# Altium schematic symbol library KartaRfLibs.SchLib: 43 symbols
Pins are listed as number, name and electrical type; pins without a type are passive.

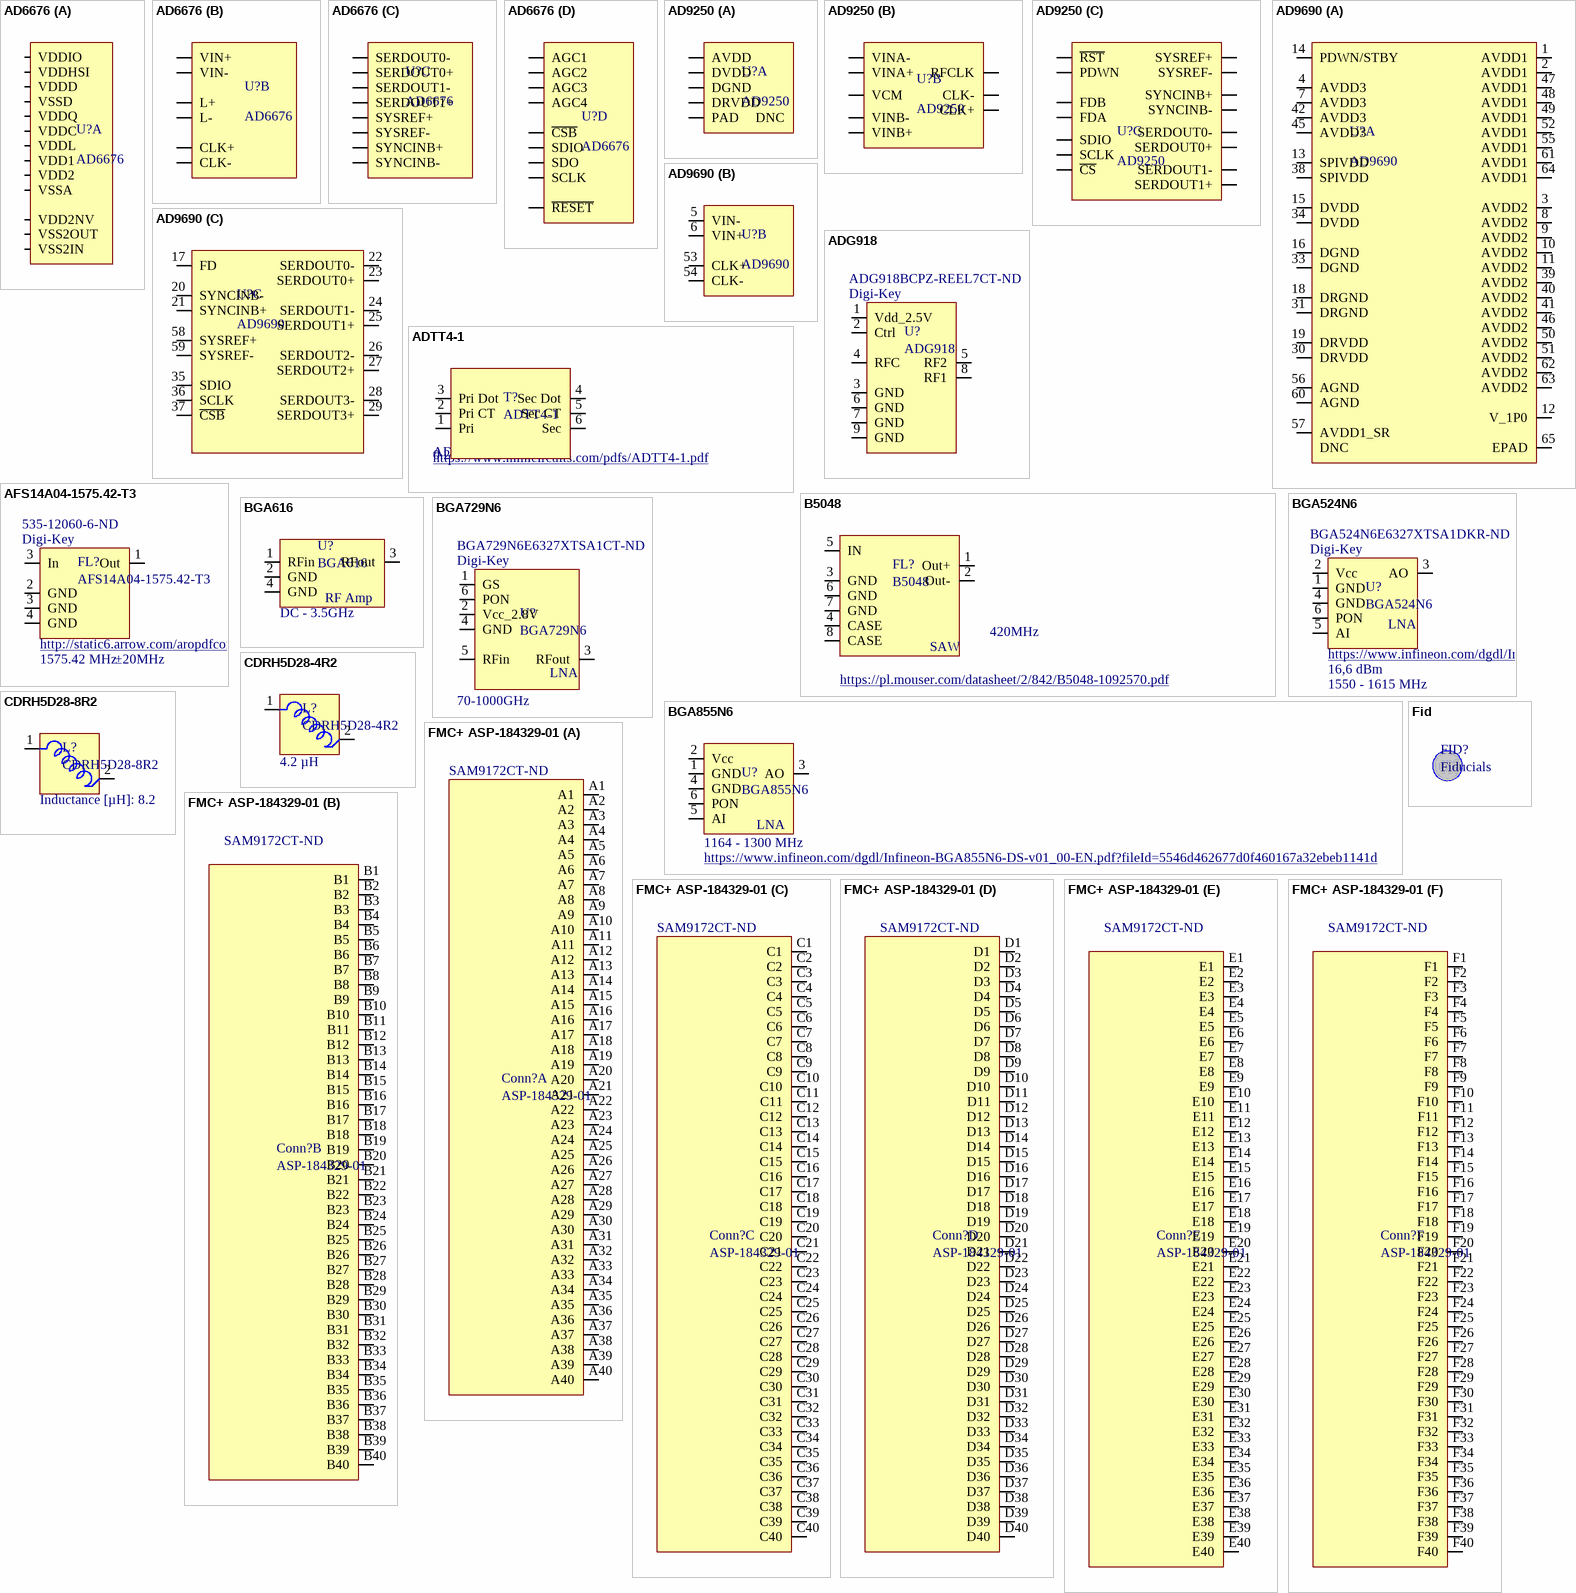
[diagram p0: symbols AD6676 to FMC+ ASP-184329-01]

## AD6676
designator U?
footprint AD6676_BGA80C50P8X10_429X504X60 (AD6676 BGA, 80-Leads, Body 4,29x5,04mmx0,60mm, Pitch 0,50mm)
part A pins: A1 VDDQ, A2,A4,B2,B3,B5,C3,C4,C6,D3,D7 VDD1, A3, A8, B4, C5, C7, D6, D8, E1, E2,E3, E4, E5, E6, F1, F2, F3, F8 VSSA, A5,B6,B7,E7,E8 VDD2, C2,D1,D2 VDDC, D4,D5 VDDL, F4,F5,G2,G3,G4,G5,H2 VSSD, F6 VSS2IN, F7 VDD2NV, G7 VSS2OUT, G8 VDDIO, H3,H4,H5,J3,J4,J5 VDDD, J1,J2 VDDHSI
part B pins: A6 L+, A7 L-, B1 CLK+, B8 VIN+, C1 CLK-, C8 VIN-
part C pins: G1 SYSREF+, H1 SYSREF-, K1 SERDOUT0-, K2 SERDOUT0+, K3 SERDOUT1-, K4 SERDOUT1+, K5 SYNCINB+, K6 SYNCINB-
part D pins: G6 ~{RESET}, H6 SDO, H7 AGC4, H8 AGC2, J6 ~{CSB}, J7 AGC3, J8 AGC1, K7 SCLK, K8 SDIO

## AD9250
designator U?
footprint AD9250 (AD5250, QFN, 48-Leads, Body 7,00x7,00mm, Pitch 0,50mm, Thermal Pad 5,60x5,60mm, IPC Medium Density)
part A pins: 1, 5, 8, 36, 37, 40, 41, 43, 44, 47, 48 AVDD, 9, 11, 13, 16, 24, 25, 30 DVDD, 12, 28, 29, 35 DNC, 17, 23 DGND, 20 DRVDD, 49 PAD
part B pins: 2 RFCLK, 3 CLK-, 4 CLK+, 38 VINA-, 39 VINA+, 42 VCM, 45 VINB+, 46 VINB-
part C pins: 6 SYSREF+, 7 SYSREF-, 10 ~{RST}, 14 SYNCINB+, 15 SYNCINB-, 18 SERDOUT1+, 19 SERDOUT1-, 21 SERDOUT0-, 22 SERDOUT0+, 26 FDB, 27 FDA, 31 SDIO, 32 SCLK, 33 ~{CS}, 34 PDWN

## AD9690
designator U?
Supplier 1: Digi-Key; Supplier Part Number 1: AD9690BCPZ-500-ND
footprint AD9690 (AD9690 9 x 9mm, 64 pin, 0.5 pitch 7.6sq Pad)
part A pins: 1 AVDD1, 2 AVDD1, 3 AVDD2, 4 AVDD3, 7 AVDD3, 8 AVDD2, 9 AVDD2, 10 AVDD2, 11 AVDD2, 12 V_1P0, 13 SPIVDD, 14 PDWN/STBY, 15 DVDD, 16 DGND, 18 DRGND, 19 DRVDD, 30 DRVDD, 31 DRGND, 33 DGND, 34 DVDD, 38 SPIVDD, 39 AVDD2, 40 AVDD2, 41 AVDD2, 42 AVDD3, 44, 43, 32 DNC, 45 AVDD3, 46 AVDD2, 47 AVDD1, 48 AVDD1, 49 AVDD1, 50 AVDD2, 51 AVDD2, 52 AVDD1, 55 AVDD1, 56 AGND, 57 AVDD1_SR, 60 AGND, 61 AVDD1, 62 AVDD2, 63 AVDD2, 64 AVDD1, 65 EPAD
part B pins: 5 VIN-, 6 VIN+, 53 CLK+, 54 CLK-
part C pins: 17 FD, 20 SYNCINB-, 21 SYNCINB+, 22 SERDOUT0-, 23 SERDOUT0+, 24 SERDOUT1-, 25 SERDOUT1+, 26 SERDOUT2-, 27 SERDOUT2+, 28 SERDOUT3-, 29 SERDOUT3+, 35 SDIO, 36 SCLK, 37 ~{CSB}, 58 SYSREF+, 59 SYSREF-

## ADG918
designator U?  Supplier 1: Digi-Key  Supplier Part Number 1: ADG918BCPZ-REEL7CT-ND
Supplier: Digi-Key; Supplier Part Number: ADG918BCPZ-REEL7CT-ND
footprint CP-8-13 (CP-8-13, 8-Leads, Body 3,00x3,00mm, Pitch 0,50mm, Thermal Pad 0,00x0,00mm, IPC Medium Density)
pins: 1 Vdd_2.5V, 2 Ctrl, 3 GND, 4 RFC, 5 RF2, 6 GND, 7 GND, 8 RF1, 9 GND

## ADTT4-1
designator T?  Frequency: 0.2 to 120MHz
URL: https://www.minicircuits.com/pdfs/ADTT4-1.pdf; Part Number: ADTT4-1
footprint CD636 (CD636,  6-Leads, Body 7,78x7,62mm, Pitch 2,45mm, IPC Medium Density)
pins: 1 Pri, 2 Pri CT, 3 Pri Dot, 4 Sec Dot, 5 Sec CT, 6 Sec

## AFS14A04-1575.42-T3
designator FL?  BW: ±20MHz  Fc: 1575.42 MHz  Supplier 1: Digi-Key  Supplier Part Number 1: 535-12060-6-ND
Part Number: AFS14A04-1575.42-T3; Supplier: Digi-Key; Supplier Part Number: 535-12060-1-ND; URL: http://static6.arrow.com/aropdfconversion/5a24a491d00decde14d1d2c137940a1b59312f0e/89afs14a04-1575.42-t3.pdf
footprint AFS14A04-1575.42-T3 (AFS14A04-1575.42-T3, SAW Filter, 6-Leads, Body 1,40x0,90mm, Pitch 0,50mm, IPC Medium Density)
pins: 1 Out, 2 GND, 3 In, 3 GND, 4 GND

## B5048
designator FL?  Fc: 420MHz
BW: 20MHz; Part Number: B5048; URL: https://pl.mouser.com/datasheet/2/842/B5048-1092570.pdf; Supplier 1: Digi-Key; Supplier Part Number 1: B39421B5048Z810-ND; Supplier 2: Mouser; Supplier Part Number 2: 871-B39421B5048Z810
footprint B5048 (B5048, Tetra SAW, QFN, 8-Leads, Body 3,80x3,80mm, Pitch 1,27mm, IPC Medium Density)
pins: 1 Out+, 2 Out-, 3 GND, 4 CASE, 5 IN, 6 GND, 7 GND, 8 CASE
text: SAW

## BGA524N6
designator U?  Operating Frequency: 1550 - 1615 MHz  Gain: 16,6 dBm  Supplier 1: Digi-Key  Supplier Part Number 1: BGA524N6E6327XTSA1DKR-ND
Part Number: BGA524N6; URL: https://www.infineon.com/dgdl/Infineon-BGA524N6-DS-v03_00-en.pdf?fileId=db3a304344e406b50144e44dfad302b9
footprint TSNP-6-10-FP (TSNP-6-10-FP, SOTFL, 6-Leads, Body 1,10x0,80mm, Pitch 0,40mm, IPC Medium Density)
pins: 1 GND, 2 Vcc, 3 AO, 4 GND, 5 AI, 6 PON
text: LNA

## BGA616
designator U?  Frequency: DC - 3.5GHz
Supplier 1: Digi-Key; Supplier Part Number 1: BGA616H6327XTSA1CT-ND
footprint GPS05605 (SOT343, 4-Leads, Body 2,00x2,15mm, Pitch 1,30mm, IPC High Density)
pins: 1 RFin, 2 GND, 3 RFout, 4 GND
text: RF Amp

## BGA729N6
designator U?  Frequency: 70-1000GHz  Supplier 1: Digi-Key  Supplier Part Number 1: BGA729N6E6327XTSA1CT-ND
Part Number: BGA729N6
footprint TSNP-6-10-FP (TSNP-6-10-FP, SOTFL, 6-Leads, Body 1,10x0,80mm, Pitch 0,40mm, IPC Medium Density)
pins: 1 GS, 2 Vcc_2.8V, 3 RFout, 4 GND, 5 RFin, 6 PON
text: LNA

## BGA855N6
designator U?  Frequency range: 1164 - 1300 MHz
Part Number: BGA855N6; URL: https://www.infineon.com/dgdl/Infineon-BGA855N6-DS-v01_00-EN.pdf?fileId=5546d462677d0f460167a32ebeb1141d
footprint TSNP-6-10-FP (TSNP-6-10-FP, SOTFL, 6-Leads, Body 1,10x0,80mm, Pitch 0,40mm, IPC Medium Density)
pins: 1 GND, 2 Vcc, 3 AO, 4 GND, 5 AI, 6 PON
text: LNA

## CDRH5D28-4R2
designator L?  Inductance: 4.2 µH
Supplier 1: Digi-Key; Supplier Part Number 1: 308-2193-1-ND
footprint CDRH5D28 (CDRH5D28 , Precision Wire Wound Inductor, 2-Leads, Body 6,00x6,00mm, IPC High Density)
pins: 1, 2

## CDRH5D28-8R2
designator L?  Inductance [µH]: 8.2
Part Number: CDRH5D28NP-8R2; Supplier Part Number 2: 308-2309-6-ND; Supplier 2: Digi-Key
footprint CDRH5D28 (CDRH5D28 , Precision Wire Wound Inductor, 2-Leads, Body 6,00x6,00mm, IPC High Density)
pins: 1, 2

## Fid
designator FID?, comment Fiducials
footprint Fiducials

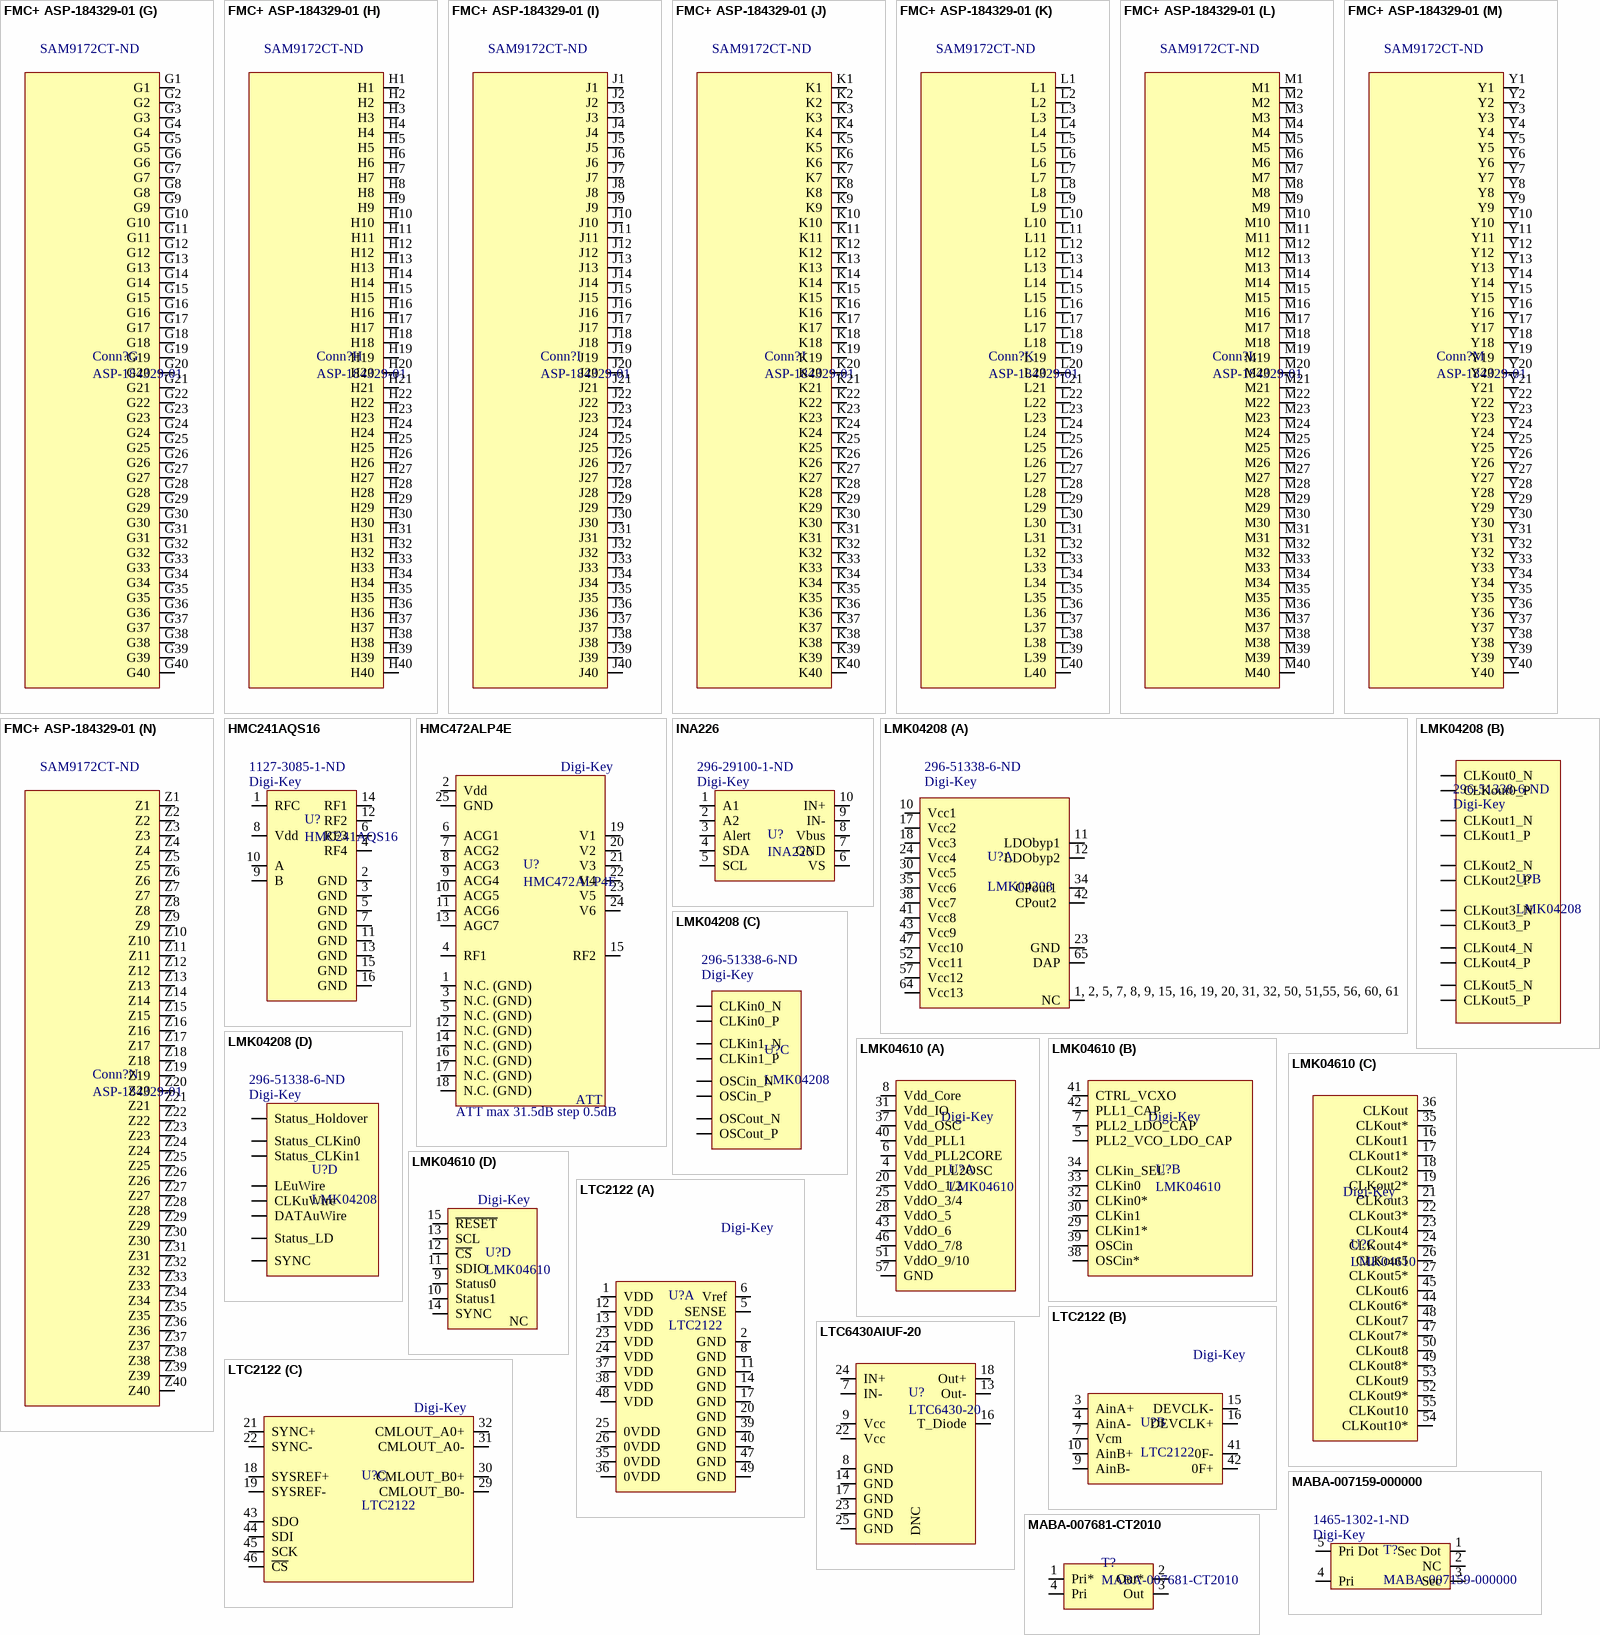
[diagram p1: symbols FMC+ ASP-184329-01 to MABA-007681-CT2010]

## FMC+ ASP-184329-01
designator Conn?, comment ASP-184329-01  Supplier Part Number 1: SAM9172CT-ND
Manufacturer: Samtec; Description: 14 ROW .050 PITCH SCKT ARRAY ASS; Supplier 1: Digi-Key; Manufacturer Part Number: ASP-184329-01; Stock 1: 900; Pricing 1: 1 = 42,21000, 10 = 38,09900, 25 = 36,50240, 50 = 34,22100, 100 = 33,08030 (USD); RoHS: No; ComponentLink1URL: http://suddendocs.samtec.com/prints/asp-184329-01-mkt.pdf?src-supplier=Digi-Key; ComponentLink1Description: http://suddendocs.samtec.com/prints/asp-184329-01-mkt.pdf?src-supplier=Digi-Key
footprint ASP-184330-01 (Samtec ASP-184330-01 FMC+ connector, 560-Leads, Body 55,78x19,76mmx7,11mm, Pitch 1,27mm)
part A pins: A1, A2, A3, A4, A5, A6, A7, A8, A9, A10, A11, A12, A13, A14, A15, A16, A17, A18, A19, A20, A21, A22, A23, A24, A25, A26, A27, A28, A29, A30, A31, A32, A33, A34, A35, A36, A37, A38, A39, A40
part B pins: B1, B2, B3, B4, B5, B6, B7, B8, B9, B10, B11, B12, B13, B14, B15, B16, B17, B18, B19, B20, B21, B22, B23, B24, B25, B26, B27, B28, B29, B30, B31, B32, B33, B34, B35, B36, B37, B38, B39, B40
part C pins: C1, C2, C3, C4, C5, C6, C7, C8, C9, C10, C11, C12, C13, C14, C15, C16, C17, C18, C19, C20, C21, C22, C23, C24, C25, C26, C27, C28, C29, C30, C31, C32, C33, C34, C35, C36, C37, C38, C39, C40
part D pins: D1, D2, D3, D4, D5, D6, D7, D8, D9, D10, D11, D12, D13, D14, D15, D16, D17, D18, D19, D20, D21, D22, D23, D24, D25, D26, D27, D28, D29, D30, D31, D32, D33, D34, D35, D36, D37, D38, D39, D40
part E pins: E1, E2, E3, E4, E5, E6, E7, E8, E9, E10, E11, E12, E13, E14, E15, E16, E17, E18, E19, E20, E21, E22, E23, E24, E25, E26, E27, E28, E29, E30, E31, E32, E33, E34, E35, E36, E37, E38, E39, E40
part F pins: F1, F2, F3, F4, F5, F6, F7, F8, F9, F10, F11, F12, F13, F14, F15, F16, F17, F18, F19, F20, F21, F22, F23, F24, F25, F26, F27, F28, F29, F30, F31, F32, F33, F34, F35, F36, F37, F38, F39, F40
part G pins: G1, G2, G3, G4, G5, G6, G7, G8, G9, G10, G11, G12, G13, G14, G15, G16, G17, G18, G19, G20, G21, G22, G23, G24, G25, G26, G27, G28, G29, G30, G31, G32, G33, G34, G35, G36, G37, G38, G39, G40
part H pins: H1, H2, H3, H4, H5, H6, H7, H8, H9, H10, H11, H12, H13, H14, H15, H16, H17, H18, H19, H20, H21, H22, H23, H24, H25, H26, H27, H28, H29, H30, H31, H32, H33, H34, H35, H36, H37, H38, H39, H40
part I pins: J1, J2, J3, J4, J5, J6, J7, J8, J9, J10, J11, J12, J13, J14, J15, J16, J17, J18, J19, J20, J21, J22, J23, J24, J25, J26, J27, J28, J29, J30, J31, J32, J33, J34, J35, J36, J37, J38, J39, J40
part J pins: K1, K2, K3, K4, K5, K6, K7, K8, K9, K10, K11, K12, K13, K14, K15, K16, K17, K18, K19, K20, K21, K22, K23, K24, K25, K26, K27, K28, K29, K30, K31, K32, K33, K34, K35, K36, K37, K38, K39, K40
part K pins: L1, L2, L3, L4, L5, L6, L7, L8, L9, L10, L11, L12, L13, L14, L15, L16, L17, L18, L19, L20, L21, L22, L23, L24, L25, L26, L27, L28, L29, L30, L31, L32, L33, L34, L35, L36, L37, L38, L39, L40
part L pins: M1, M2, M3, M4, M5, M6, M7, M8, M9, M10, M11, M12, M13, M14, M15, M16, M17, M18, M19, M20, M21, M22, M23, M24, M25, M26, M27, M28, M29, M30, M31, M32, M33, M34, M35, M36, M37, M38, M39, M40
part M pins: Y1, Y2, Y3, Y4, Y5, Y6, Y7, Y8, Y9, Y10, Y11, Y12, Y13, Y14, Y15, Y16, Y17, Y18, Y19, Y20, Y21, Y22, Y23, Y24, Y25, Y26, Y27, Y28, Y29, Y30, Y31, Y32, Y33, Y34, Y35, Y36, Y37, Y38, Y39, Y40
part N pins: Z1, Z2, Z3, Z4, Z5, Z6, Z7, Z8, Z9, Z10, Z11, Z12, Z13, Z14, Z15, Z16, Z17, Z18, Z19, Z20, Z21, Z22, Z23, Z24, Z25, Z26, Z27, Z28, Z29, Z30, Z31, Z32, Z33, Z34, Z35, Z36, Z37, Z38, Z39, Z40

## HMC241AQS16
designator U?  Supplier 1: Digi-Key  Supplier Part Number 1: 1127-3085-1-ND
Part Number: HMC241AQS16; URL: https://www.analog.com/media/en/technical-documentation/data-sheets/hmc241aqs16e.pdf
footprint HMC241A (HMC241A, SOP, 16-Leads, Body 5,00x3,00mm, Pitch 0,64mm, IPC Medium Density)
pins: 1 RFC, 2 GND, 3 GND, 4 RF4, 5 GND, 6 RF3, 7 GND, 8 Vdd, 9 B, 10 A, 11 GND, 12 RF2, 13 GND, 14 RF1, 15 GND, 16 GND

## HMC472ALP4E
designator U?  Parameter 1: ATT max 31.5dB step 0.5dB  Supplier 1: Digi-Key
Part Number: HMC472ALP4E; URL: https://www.analog.com/media/en/technical-documentation/data-sheets/hmc472a.pdf; Supplier Part Number 1: 1127-3157-ND
footprint HMC472ALP4E (HMC472ALP4E, QFN, 24-Leads, Body 4,00x4,00mm, Pitch 0,50mm, Thermal Pad 2,80x2,80mm, IPC Medium Density)
pins: 1 N.C. (GND), 2 Vdd, 3 N.C. (GND), 4 RF1, 5 N.C. (GND), 6 ACG1, 7 ACG2, 8 ACG3, 9 ACG4, 10 ACG5, 11 ACG6, 12 N.C. (GND), 13 AGC7, 14 N.C. (GND), 15 RF2, 16 N.C. (GND), 17 N.C. (GND), 18 N.C. (GND), 19 V1, 20 V2, 21 V3, 22 V4, 23 V5, 24 V6, 25 GND
text: ATT

## INA226
designator U?  Supplier 1: Digi-Key  Supplier Part Number 1: 296-29100-1-ND
footprint DGS0010A (INA226, 10-Leads, Body 3,00x3,00mm, Pitch 0,50mm, IPC Medium Density)
pins: 1 A1, 2 A2, 3 Alert, 4 SDA, 5 SCL, 6 VS, 7 GND, 8 Vbus, 9 IN-, 10 IN+

## LMK04208
designator U?  Supplier 1: Digi-Key  Supplier Part Number 1: 296-51338-6-ND
footprint LMK04208 (LMK04208, PQFN, 64-Leads, Body 9,00x9,00mm, Pitch 0,50mm, Thermal Pad 7,20x7,20mm, IPC Medium Density)
part A pins: 1, 2, 5, 7, 8, 9, 15, 16, 19, 20, 31, 32, 50, 51,55, 56, 60, 61  NC, 10 Vcc1, 11 LDObyp1, 12 LDObyp2, 17 Vcc2, 18 Vcc3, 23 GND, 24 Vcc4, 30 Vcc5, 34 CPout1 , 35 Vcc6, 38 Vcc7, 41 Vcc8, 42 CPout2 , 43 Vcc9, 47 Vcc10, 52 Vcc11, 57 Vcc12, 64 Vcc13, 65 DAP
part B pins: 3 CLKout0_N, 4 CLKout0_P, 13 CLKout1_N, 14 CLKout1_P, 21 CLKout2_N, 22 CLKout2_P, 48 CLKout3_N, 49 CLKout3_P, 53 CLKout4_N, 54 CLKout4_P, 58 CLKout5_N, 59 CLKout5_P
part C pins: 25 CLKin1_N, 26 CLKin1_P, 28 CLKin0_N, 29 CLKin0_P, 36 OSCin_N, 37 OSCin_P, 39 OSCout_N, 40 OSCout_P
part D pins: 6 SYNC, 27 Status_Holdover, 33 Status_LD, 44 LEuWire, 45 CLKuWire, 46 DATAuWire, 62 Status_CLKin0 , 63 Status_CLKin1

## LMK04610
designator U?  Supplier 1: Digi-Key
Part Number: LMK04610; URL: http://www.ti.com/product/LMK04610; Supplier Part Number 1: 296-51339-1-ND
footprint RTQ0056E (LMK04610, 56-Leads, Body 7,80x7,80mm, Pitch 0,50mm, Thermal Pad 5,70x5,70mm, IPC Medium Density)
part A pins: 4 Vdd_PLL2OSC, 6 Vdd_PLL2CORE, 8 Vdd_Core, 20 VddO_1/2, 25 VddO_3/4, 28 VddO_5, 31 Vdd_IO, 37 Vdd_OSC, 40 Vdd_PLL1, 43 VddO_6, 46 VddO_7/8, 51 VddO_9/10, 57 GND
part B pins: 5 PLL2_VCO_LDO_CAP, 7 PLL2_LDO_CAP, 29 CLKin1*, 30 CLKin1, 32 CLKin0*, 33 CLKin0, 34 CLKin_SEL, 38 OSCin*, 39 OSCin, 41 CTRL_VCXO, 42 PLL1_CAP
part C pins: 16 CLKout1, 17 CLKout1*, 18 CLKout2, 19 CLKout2*, 21 CLKout3, 22 CLKout3*, 23 CLKout4, 24 CLKout4*, 26 CLKout5, 27 CLKout5*, 35 CLKout*, 36 CLKout, 44 CLKout6*, 45 CLKout6, 47 CLKout7*, 48 CLKout7, 49 CLKout8*, 50 CLKout8, 52 CLKout9*, 53 CLKout9, 54 CLKout10*, 55 CLKout10
part D pins: 1, 2, 3, 56 NC, 9 Status0, 10 Status1, 11 SDIO, 12 ~{CS}, 13 SCL, 14 SYNC, 15 ~{RESET}

## LTC2122
designator U?  Supplier 1: Digi-Key
Supplier Part Number 1: LTC2122CUK#PBF-ND
footprint LTC2122 (LTC2122, QFN, 48-Leads, Body 7,00x7,00mm, Pitch 0,50mm, Thermal Pad 5,15x5,15mm, IPC Medium Density)
part A pins: 1 VDD, 2 GND, 5 SENSE, 6 Vref, 8 GND, 11 GND, 12 VDD, 13 VDD, 14 GND, 17 GND, 20 GND, 23 VDD, 24 VDD, 25 0VDD, 26 0VDD, 35 0VDD, 36 0VDD, 37 VDD, 38 VDD, 39 GND, 40 GND, 47 GND, 48 VDD, 49 GND
part B pins: 3 AinA+, 4 AinA-, 7 Vcm, 9 AinB-, 10 AinB+, 15 DEVCLK-, 16 DEVCLK+, 41 0F-, 42 0F+
part C pins: 18 SYSREF+, 19 SYSREF-, 21 SYNC+, 22 SYNC-, 29 CMLOUT_B0-, 30 CMLOUT_B0+, 31 CMLOUT_A0-, 32 CMLOUT_A0+, 43 SDO, 44 SDI, 45 SCK, 46 ~{CS}

## LTC6430AIUF-20
designator U?, comment LTC6430-20
Part Number: LTC6430-20; URL: https://www.analog.com/media/en/technical-documentation/data-sheets/643020f.pdf
footprint LTC6430AIUF-20 (LTC6430AIUF-20, QFN, 24-Leads, Body 4,00x4,00mm, Pitch 0,50mm, Thermal Pad 2,45x2,45mm, IPC Medium Density)
pins: 1, 2, 3, 4, 5, 6, 10, 11, 12, 15, 19, 20, 21 DNC, 7 IN-, 8 GND, 9 Vcc, 13 Out-, 14 GND, 16 T_Diode, 17 GND, 18 Out+, 22 Vcc, 23 GND, 24 IN+, 25 GND

## MABA-007159-000000
designator T?  Supplier 1: Digi-Key  Supplier Part Number 1: 1465-1302-1-ND
footprint MABA-007159-000000 (MABA-007159-000000, 5-Leads, Body 3,80x4,83mm, Pitch 1,25mm, IPC Medium Density)
pins: 1 Sec Dot, 2 NC, 3 Sec, 4 Pri, 5 Pri Dot

## MABA-007681-CT2010
designator T?
RF Transformer 1.414: 1 4Term. SMD; Manufacturer: TE Connectivity MA-COM; Current Rating: 600mA; Power Rating: 250mW; Supplier 1: Digi-Key; Manufacturer Part Number: MABA-007681-CT2010; Stock 1: 222; Pricing 1: 1 = 2,84000, 10 = 2,27000, 25 = 1,84480, 50 = 1,79740, 100 = 1,75010, 250 = 1,70280 (USD); RoHS: Yes; Mount: Surface Mount; Case/Package: SMD/SMT; Number of Pins: 4; Min Operating Temperature: -40°C; Max Operating Temperature: 85°C; Packaging: Tape and Reel; Package Quantity: 900; Termination: SMD/SMT; Turns Ratio: 1.414:1; Max DC Current: 600mA; Length: 7.11mm; Height: 3.33mm; Width: 6.35mm; Depth: 6.35mm; Radiation Hardening: No; ComponentLink1URL: https://datasheet.ciiva.com/4551/ds-maba-007681-ct2010-v2-20376-4551345.pdf?src-supplier=Mouser; ComponentLink1Description: https://datasheet.ciiva.com/4551/ds-maba-007681-ct2010-v2-20376-4551345.pdf?src-supplier=Mouser; ComponentLink2URL: https://datasheet.ciiva.com/29655/maba-007681-ct2010-29655680.pdf?src-supplier=Digi-Key; ComponentLink2Description: https://datasheet.ciiva.com/29655/maba-007681-ct2010-29655680.pdf?src-supplier=Digi-Key; ComponentLink3URL: https://datasheet.ciiva.com/15154/getdatasheetpartid-721834-15154840.pdf?src-supplier=Verical; ComponentLink3Description: https://datasheet.ciiva.com/15154/getdatasheetpartid-721834-15154840.pdf?src-supplier=Verical; ComponentLink4URL: https://datasheet.ciiva.com/3296/maba-007681-ct2010-3296009.pdf?src-supplier=Avnet; ComponentLink4Description: https://datasheet.ciiva.com/3296/maba-007681-ct2010-3296009.pdf?src-supplier=Avnet; Supplier Part Number 1: 1465-1304-1-ND
footprint MABA-007681-CT2010 (MABA-007681-CT2010, 4-Leads, Pitch 5,08mm,  Body 7,11x6,35mm,  IPC High Density)
pins: 1 Pri*, 2 Out*, 3 Out, 4 Pri

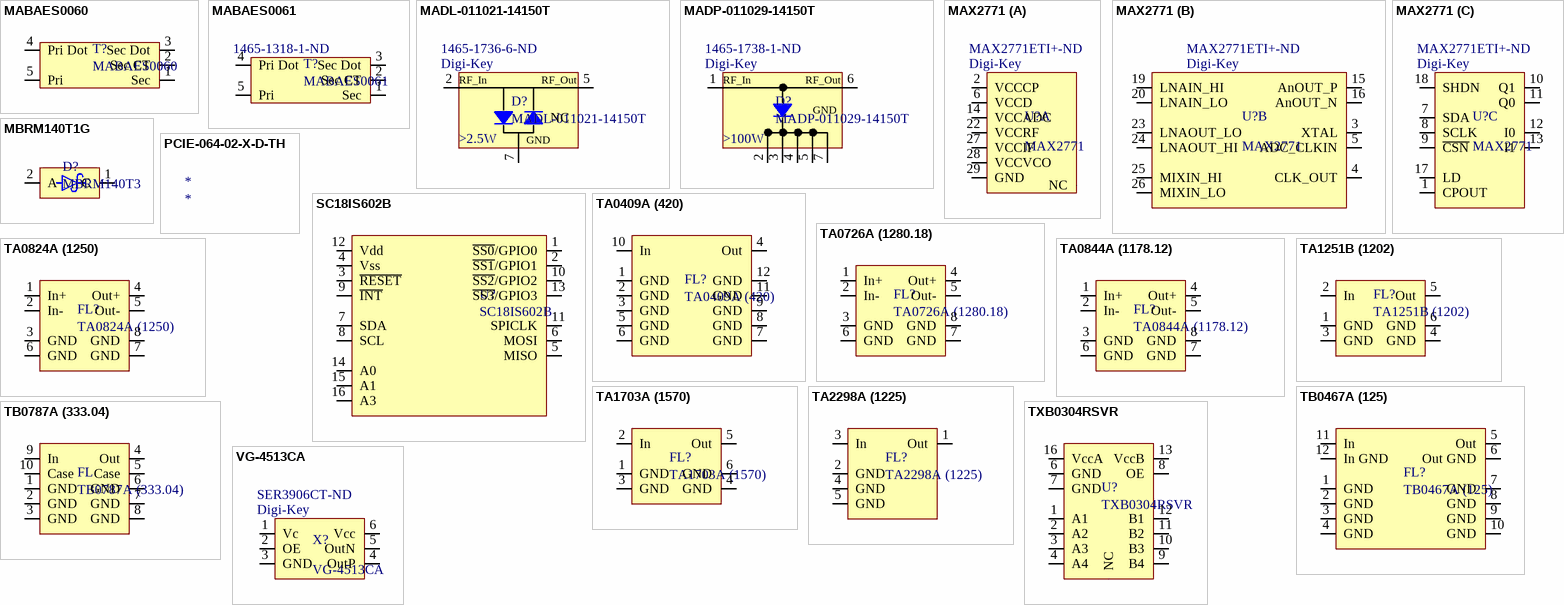
[diagram p2: symbols MABAES0060 to VG-4513CA]

## MABAES0060
designator T?
footprint MABA-007159-000000 (MABA-007159-000000, 5-Leads, Body 3,80x4,83mm, Pitch 1,25mm, IPC Medium Density)
pins: 1 Sec, 2 Sec CT, 3 Sec Dot, 4 Pri Dot, 5 Pri

## MABAES0061
designator T?  Supplier Part Number 1: 1465-1318-1-ND
Manufacturer: TE Connectivity MA-COM; Turns Ratio: 1:2; Power Rating: 250mW; Max DC Current: 240mA; Insertion Loss: 3dB; Supplier 1: Digi-Key; Manufacturer Part Number: MABAES0061; Stock 1: 4458; Pricing 1: 1 = 2,11000, 10 = 1,69000, 25 = 1,37280, 50 = 1,33760, 100 = 1,30240, 250 = 1,26720, 500 = 1,25664, 1000 = 1,11232 (USD); RoHS: Yes; Mount: Surface Mount; Case/Package: SMD/SMT; Number of Pins: 5; Min Operating Temperature: -40°C; Max Operating Temperature: 85°C; Packaging: Tape and Reel; Package Quantity: 2000; Termination: SMD/SMT; Length: 3.81mm; Height: 2.67mm; Depth: 3.81mm; Width: 3.81mm; Radiation Hardening: No; Lead Free: Lead Free; ComponentLink1URL: https://datasheet.ciiva.com/3295/mabaes0061-3295937.pdf?src-supplier=Avnet; ComponentLink1Description: https://datasheet.ciiva.com/3295/mabaes0061-3295937.pdf?src-supplier=Avnet; ComponentLink2URL: https://datasheet.ciiva.com/4550/mabaes0061-39711-4550870.pdf?src-supplier=Mouser; ComponentLink2Description: https://datasheet.ciiva.com/4550/mabaes0061-39711-4550870.pdf?src-supplier=Mouser; ComponentLink3URL: https://datasheet.ciiva.com/29655/mabaes0061-v6-29655692.pdf?src-supplier=Digi-Key; ComponentLink3Description: https://datasheet.ciiva.com/29655/mabaes0061-v6-29655692.pdf?src-supplier=Digi-Key; ComponentLink4URL: https://datasheet.ciiva.com/15154/getdatasheetpartid-470951-15154795.pdf?src-supplier=Verical; ComponentLink4Description: https://datasheet.ciiva.com/15154/getdatasheetpartid-470951-15154795.pdf?src-supplier=Verical
footprint MABAES0061 (MABAES0061, 5-Leads, Body 3,81x4,83mm, Pitch 1,27mm, IPC Medium Density)
pins: 1 Sec, 2 Sec CT, 3 Sec Dot, 4 Pri Dot, 5 Pri

## MADL-011021-14150T
designator D?  Supplier 1: Digi-Key  Supplier Part Number 1: 1465-1736-6-ND
footprint ODS-1415 (MADP-011029-14150T, PSON, 6-Leads, Body 1,20x1,50mm, Pitch 0,40mm, Thermal Pad 0,85x0,42mm, IPC Medium Density)
pins: 1, 3, 4, 6 NC, 2 RF_In, 5 RF_Out, 7 GND
text: >2.5W

## MADP-011029-14150T
designator D?  Supplier 1: Digi-Key  Supplier Part Number 1: 1465-1738-1-ND
Part Number: MADP-011029-14150T
footprint ODS-1415 (MADP-011029-14150T, PSON, 6-Leads, Body 1,20x1,50mm, Pitch 0,40mm, Thermal Pad 0,85x0,42mm, IPC Medium Density)
pins: 1 RF_In, 2 GND, 3 GND, 4 GND, 5 GND, 6 RF_Out, 7 GND
text: >100W

## MAX2771
designator U?  Supplier 1: Digi-Key  Supplier Part Number 1: MAX2771ETI+-ND
footprint MAX2771 T2855-8 (MAX2771 T2855-8 QFN, 28-Leads, Body 5,00x5,00mm, Pitch 0,50mm, Thermal Pad 3,25x3,25mm, IPC Medium Density)
part A pins: 2 VCCCP, 6 VCCD, 14 VCCADC, 21 NC, 22 VCCRF, 27 VCCIF, 28 VCCVCO, 29 GND
part B pins: 3 XTAL, 4 CLK_OUT, 5 ADC_CLKIN, 15 AnOUT_P, 16 AnOUT_N, 19 LNAIN_HI, 20 LNAIN_LO, 23 LNAOUT_LO, 24 LNAOUT_HI, 25 MIXIN_HI, 26 MIXIN_LO
part C pins: 1 CPOUT, 7 SDA, 8 SCLK, 9 ~{CSN}, 10 Q1, 11 Q0, 12 I0, 13 I1, 17 LD, 18 SHDN

## MBRM140T1G
designator D?, comment MBRM140T3
Supplier Part Number 1: MBRM140T3GOSCT-ND; Supplier 1: Digi-Key
footprint CASE 457 (CASE 457-04, MBRM140T1G)
pins: 1 C, 2 A

## PCIE-064-02-X-D-TH
designator *

## SC18IS602B
designator U?
Supplier Part Number 1: 568-13691-1-ND; Supplier 1: Digi-Key
footprint SOT403-1 (SC18IS602B, TSSOP16, 16-Leads, Body 5,00x4,40mm, Pitch 0,65mm, IPC Medium Density)
pins: 1 ~{SS0}/GPIO0, 2 ~{SS1}/GPIO1, 3 ~{RESET}, 4 Vss, 5 MISO, 6 MOSI, 7 SDA, 8 SCL, 9 ~{INT}, 10 ~{SS2}/GPIO2, 11 SPICLK, 12 Vdd, 13 ~{SS3}/GPIO3, 14 A0, 15 A1, 16 A3

## TA0409A (420)
designator FL?
SAW filter 420MHz; BW: 10MHz; IL (max): 3.5dB; In Pow (max): 10 dBm; Impedance In, Out: 50 Ohm; Fc: 420MHz
footprint Tai-Saw_7x5p12 (TA0409A, 12-Pins, Body 5,00x7,00mmx1,70mm, Pitch 1,27mm, IPC Medium Density)
pins: 1 GND, 2 GND, 3 GND, 4 Out, 5 GND, 6 GND, 7 GND, 8 GND, 9 GND, 10 In, 11 GND, 12 GND

## TA0726A (1280.18)
designator FL?
SAW Filter 1280.16MHz; Impedance In, Out: 150 Ohm; IL (max): 5 dB; BW: 40; In Power (max): 10 dBm; Fc: 1280.18
footprint Tai-Saw_3x3p8 (TA0726A, 8-Pins, Body 3,00x3,00mmx1,40mm, Pitch 1,20mm, IPC Medium Density)
pins: 1 In+, 2 In-, 3 GND, 4 Out+, 5 Out-, 6 GND, 7 GND, 8 GND

## TA0824A (1250)
designator FL?
SAW Filter 1250MHz
footprint Tai-Saw_3x3p8 (TA0726A, 8-Pins, Body 3,00x3,00mmx1,40mm, Pitch 1,20mm, IPC Medium Density)
pins: 1 In+, 2 In-, 3 GND, 4 Out+, 5 Out-, 6 GND, 7 GND, 8 GND

## TA0844A (1178.12)
designator FL?
SAW Filter 1178.12MHz; BW: 40 MHz; IL (max): 5dB; Impedance In, Out: 150 Ohm; In Power (max): 10dBm; Fc: 1178.12
footprint Tai-Saw_3x3p8 (TA0726A, 8-Pins, Body 3,00x3,00mmx1,40mm, Pitch 1,20mm, IPC Medium Density)
pins: 1 In+, 2 In-, 3 GND, 4 Out+, 5 Out-, 6 GND, 7 GND, 8 GND

## TA1251B (1202)
designator FL?
SAW Filter 1202 MHz; BW: 30MHz; IL (max): 3.3 dB; In Power (max): 20 dBm; Impedance In, Out: 50 Ohm; Fc: 1202MHz
footprint Tai-Saw_3x3p6 (TA1251B, 6-Pins, Body 3,00x3,00mmx1,40mm, Pitch 1,20mm, IPC Medium Density)
pins: 1 GND, 2 In, 3 GND, 4 GND, 5 Out, 6 GND

## TA1703A (1570)
designator FL?
SAW Filter 1570 MHz; BW: 80 MHz; IL (max): 4.2 dB; Impedance In, Out: 50 Ohm; In Power (max): 10 dBm; Fc: 1570 MHz
footprint Tai-Saw_3x3p6 (TA1251B, 6-Pins, Body 3,00x3,00mmx1,40mm, Pitch 1,20mm, IPC Medium Density)
pins: 1 GND, 2 In, 3 GND, 4 GND, 5 Out, 6 GND

## TA2298A (1225)
designator FL?
SAW Filter 1225 MHz GPS L2; BW: 80 MHz; IL (max): 2.8 dB; Impedance In, Out: 50; In Power (max): 10 dBm; Fc: 1225 MHz
footprint Tai-Saw_1.4x1.1p5 (TA2298A, 6-Leads, Body 1,40x1,10mm, Pitch 0,57mm/0,50mm, IPC Medium Density)
pins: 1 Out, 2 GND, 3 In, 4 GND, 5 GND

## TB0467A (125)
designator FL?
IF SAW Filter 125MHz; BW: 30 MHz; IL (max): 13.5 dB; Impedance In, Out: 50 Ohm (LC); In Power (max): 10 dBm; Fc: 125 MHz
footprint Tai-Saw_13,3x6,5p12 (TB0467A, 12-Pins, Body 13,30x6,5mmx1,40mm, Pitch 2,54mm, IPC Medium Density)
pins: 1 GND, 2 GND, 3 GND, 4 GND, 5 Out, 6 Out GND, 7 GND, 8 GND, 9 GND, 10 GND, 11 In, 12 In GND

## TB0787A (333.04)
designator FL
IF SAW Filter 333.04 MHz; BW: 7MHz; FC: 333.04; IL (max): 15dB; Impedance In, Out: 50Ohm(LC); In Power (max): 10 dBm
footprint Tai-Saw_7x5p10 (TA0409A, 10-Pins, Body 5,00x7,00mmx1,70mm, Pitch 1,27mm, IPC Medium Density)
pins: 1 GND, 2 GND, 3 GND, 4 Out, 5 Case, 6 GND, 7 GND, 8 GND, 9 In, 10 Case

## TXB0304RSVR
designator U?
Manufacturer: Texas Instruments; Max Supply Voltage: 3.6V; Min Supply Voltage: 900mV; Data Rate: 140Mbps; Number of Channels: 4; Propagation Delay: 4.8ns; Logic Function: Translator; Nominal Supply Current: 5uA; Turn-On Delay Time: 18.9ns; High Level Output Current: -20uA; Low Level Output Current: 20uA; Quiescent Current: 10uA; Supplier 1: Digi-Key; Supplier Part Number 1: 296-29681-1-ND; Manufacturer Part Number: TXB0304RSVR; Stock 1: 8443; Pricing 1: 1 = 1,45000, 10 = 1,29700, 100 = 1,01160, 500 = 0,83564, 1000 = 0,65972 (USD); RoHS: Yes; Mount: Surface Mount; Number of Pins: 16; Contact Plating: Gold; Min Operating Temperature: -40°C; Max Operating Temperature: 85°C; Packaging: Tape and Reel; Package Quantity: 1; Number of Bits: 4; Number of Outputs: 4; Number of Inputs: 4; Radiation Hardening: No; REACH SVHC: No SVHC; Lead Free: Lead Free; ComponentLink1URL: https://datasheet.ciiva.com/1900/txb0304-1900817.pdf?src-supplier=Digi-Key; ComponentLink1Description: https://datasheet.ciiva.com/1900/txb0304-1900817.pdf?src-supplier=Digi-Key; ComponentLink2URL: https://datasheet.ciiva.com/15096/getdatasheetpartid-490462-15096317.pdf?src-supplier=Verical; ComponentLink2Description: https://datasheet.ciiva.com/15096/getdatasheetpartid-490462-15096317.pdf?src-supplier=Verical; ComponentLink3URL: https://datasheet.ciiva.com/1900/txb0304-1900818.pdf?src-supplier=Digi-Key; ComponentLink3Description: https://datasheet.ciiva.com/1900/txb0304-1900818.pdf?src-supplier=Digi-Key; ComponentLink4URL: https://datasheet.ciiva.com/1900/txb0304-1900819.pdf?src-supplier=Digi-Key; ComponentLink4Description: https://datasheet.ciiva.com/1900/txb0304-1900819.pdf?src-supplier=Digi-Key; ComponentLink5URL: https://datasheet.ciiva.com/14287/txb0304-14287243.pdf?src-supplier=Avnet; ComponentLink5Description: https://datasheet.ciiva.com/14287/txb0304-14287243.pdf?src-supplier=Avnet
footprint RSV0016A (TXB0304RSVR, UQFN, 16-Leads, Body 1,80x2,60mm, Pitch 0,40mm, IPC Medium Density)
pins: 1 A1, 2 A2, 3 A3, 4 A4, 5,14,15 NC, 6 GND, 7 GND, 8 OE, 9 B4, 10 B3, 11 B2, 12 B1, 13 VccB, 16 VccA

## VG-4513CA
designator X?  Supplier 1: Digi-Key  Supplier Part Number 1: SER3906CT-ND
footprint VG-4513CA (VG-4513CA, Concave, 6-Leads, Pitch 2,54mm,  Body 7,00x5,00mm,  IPC Medium Density)
pins: 1 Vc, 2 OE, 3 GND, 4 OutP, 5 OutN, 6 Vcc